# Altium footprint library Switch Push Botton.PcbLib: 48 footprints (part 1 of 3)
Each footprint in its own frame and in the unit in brackets; x right, y up, seen from the top. Pads: shape width x height; smd on the part's side, far side on the other; paste and mask are expansions set on the pad; w line width, h text height; cw(c..) or ccw(c..) is an arc to the next point about the centre after c.
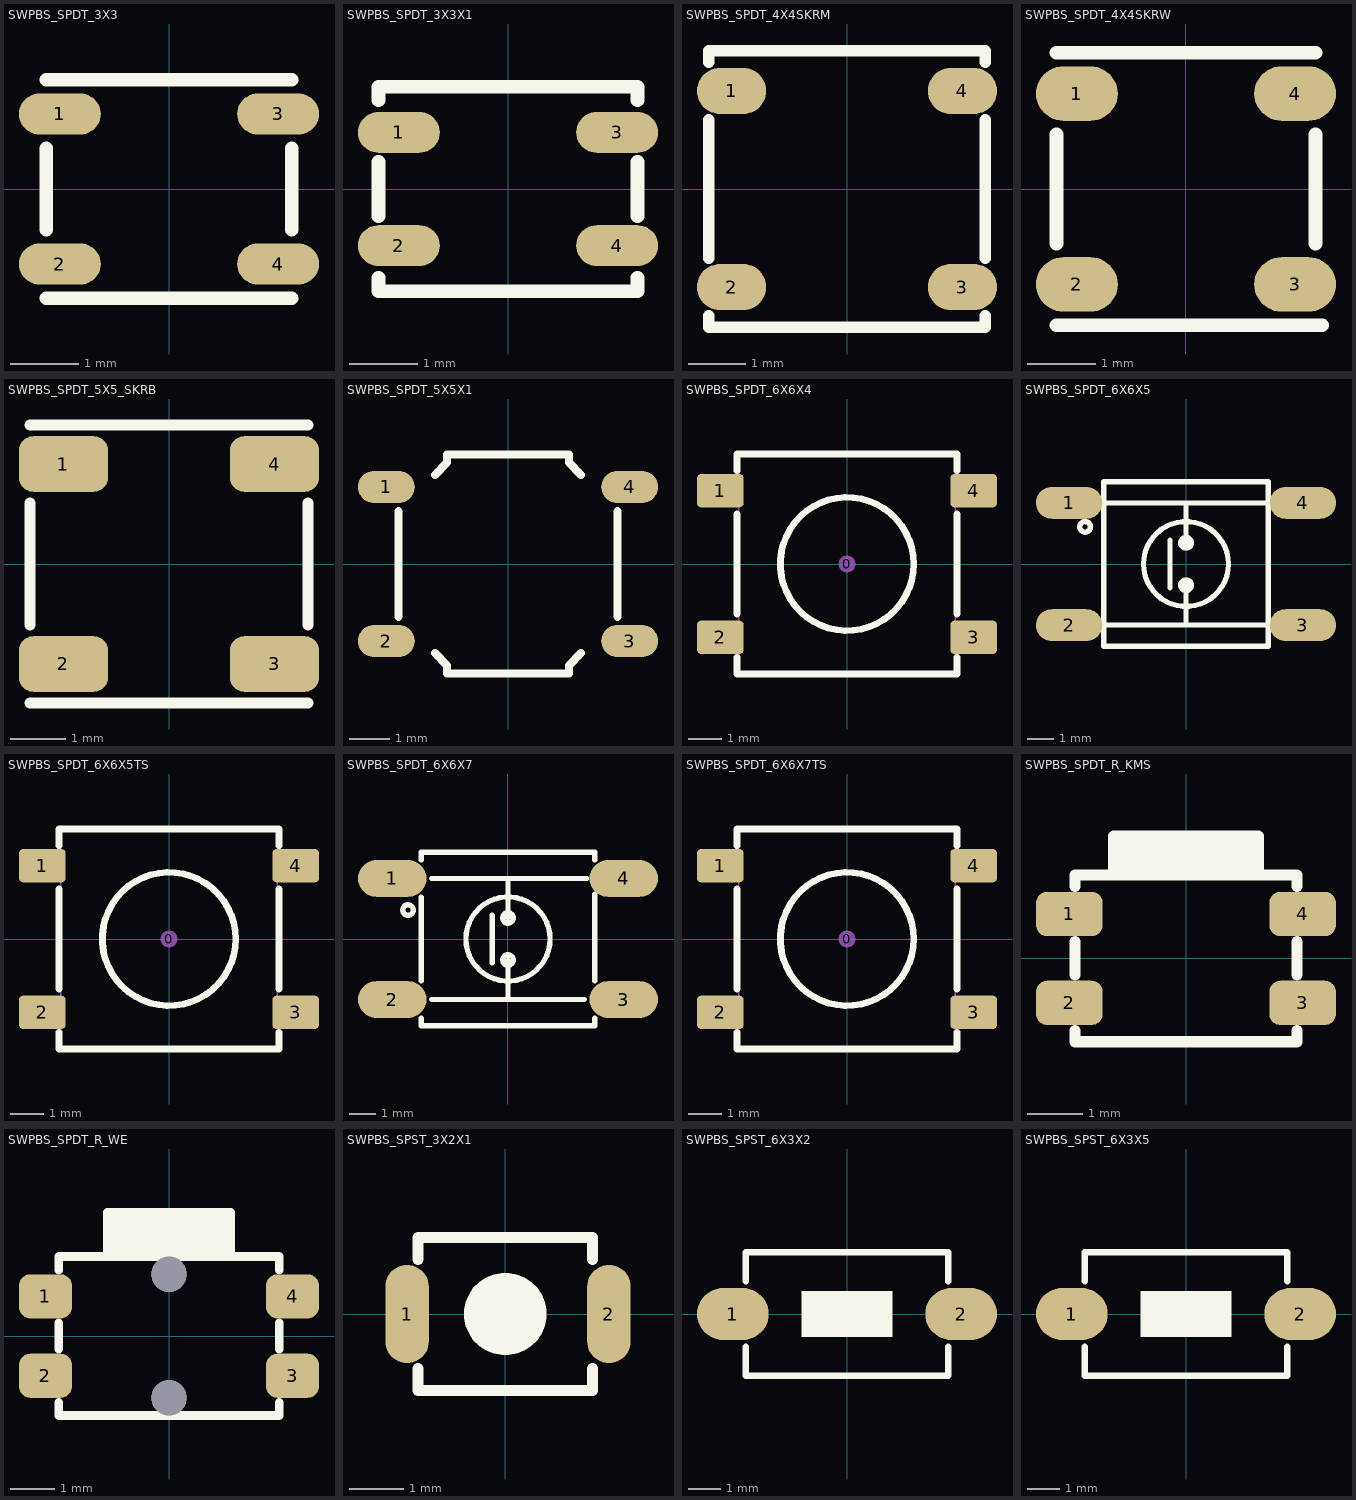
[diagram p0: the footprints below, top view; thin cyan lines are the x and y axes]

## SWPBS_SPDT_3X3 [mm] "SWITCH, PUSHBUTTON, SMD, SPDT, 3.3x2.9 mm, SKSH Series; Height 0.38mm ; 200,000 cycles ; 1.6N Force, SKSHAAE010"
height 0.379
pads (4):
  oval 1.2x0.6 smd mask+0.1: 1(-1.6,1.1) 2(-1.6,-1.1) 3(1.6,1.1) 4(1.6,-1.1)
Top Overlay:
  lines w0.2: -1.8,-1.6 1.8,-1.6 ; -1.8,-0.6 -1.8,0.6 ; -1.8,1.6 1.8,1.6 ; 1.8,-0.6 1.8,0.6
3D body "SKSHAA.STEP": height 0.4, standoff 0.03, extent -1.716,-1.48 1.717,1.48

## SWPBS_SPDT_3X3X1 [mm] "SWITCH, PUSHBUTTON, SMD, SPDT, 3.0x2.7mm, SKSG Series; Height 1.4 mm; 200,000 cycles; 4N force, SKSGAAE010"
height 1.4
pads (4):
  oval 1.2x0.6 smd mask+0.1: 1(-1.6,0.83) 2(-1.6,-0.83) 3(1.6,0.83) 4(1.6,-0.83)
Top Overlay:
  lines w0.2: -1.9,-1.3 -1.9,-1.5 1.9,-1.5 1.9,-1.3 ; -1.9,-0.4 -1.9,0.4 ; -1.9,1.3 -1.9,1.5 1.9,1.5 1.9,1.3 ; 1.9,-0.4 1.9,0.4
3D body "SKSGAA.STEP": height 1.4, standoff 0, extent -1.75,-1.387 1.75,1.387

## SWPBS_SPDT_4X4SKRM [mm] "SWITCH, PUSHBUTTON, SMD, SPDT, SKRM Series ; Height 0.4 mm ; 500,000 cycles ; 1.57N Force, SKRMAAE010"
height 0.4
pads (4):
  oval 1.2x0.8 smd mask+0.1: 1(-2,1.7) 2(-2,-1.7) 3(2,-1.7) 4(2,1.7)
Top Overlay:
  lines w0.2: -2.4,-2.2 -2.4,-2.4 2.4,-2.4 2.4,-2.2 ; -2.4,-1.2 -2.4,1.2 ; -2.4,2.2 -2.4,2.4 2.4,2.4 2.4,2.2 ; 2.4,-1.2 2.4,1.2
3D body "SKRMAA.STEP": height 0.4, standoff 0, extent -2.25,-2.25 2.25,2.25

## SWPBS_SPDT_4X4SKRW [mm] "SWITCH, PUSHBUTTON, SMD, SPDT, SKRW Series ; Height 0.35 mm ; 500,000 cycles ; 1.57N Force, SKRWAEE030"
height 0.35
pads (4):
  oval 1.2x0.8 smd mask+0.1: 1(-1.6,1.4) 2(-1.6,-1.4) 3(1.6,-1.4) 4(1.6,1.4)
Top Overlay:
  lines w0.2: -1.9,-2 2,-2 ; -1.9,-0.8 -1.9,0.8 ; -1.9,2 1.9,2 ; 1.9,-0.8 1.9,0.8
3D body "SKRWAE.STEP": height 0.38, standoff 0.03, extent -1.85,-1.85 1.85,1.85

## SWPBS_SPDT_5X5_SKRB [mm] "SWITCH, PUSHBUTTON, SMD, SPDT, SKRB Series ; Height 0.55 mm ; 2,000,000 cycles ; 1.1N Force, SKRBAGE010"
height 0.55
pads (4):
  rrect50% 1.6x1 smd mask+0.1: 1(-1.9,1.8) 2(-1.9,-1.8) 3(1.9,-1.8) 4(1.9,1.8)
Top Overlay:
  lines w0.2: -2.5,-2.5 2.5,-2.5 ; -2.5,-1.1 -2.5,1.1 ; -2.5,2.5 2.5,2.5 ; 2.5,-1.1 2.5,1.1
3D body "SKRBAG.STEP": height 0.55, standoff 0, extent -2.4,-2.4 2.4,2.4

## SWPBS_SPDT_5X5X1 [mm] "SWITCH, PUSHBUTTON, SMD, SPDT, SKQG Series ; Height 1.5 mm ; 500,000 cycles ; 0.98N Force, SKQGAFE010"
height 1.5
pads (4):
  oval 1.4x0.8 smd mask+0.1: 1(-3,1.9) 2(-3,-1.9) 3(3,-1.9) 4(3,1.9)
Top Overlay:
  lines w0.2: -2.7,-1.3 -2.7,1.3 ; -1.8,-2.2 -1.5,-2.5 -1.5,-2.7 1.5,-2.7 1.5,-2.5 1.8,-2.2 ; -1.8,2.2 -1.5,2.5 -1.5,2.7 1.5,2.7 1.5,2.5 1.8,2.2 ; 2.7,-1.3 2.7,1.3
3D body "SKQGAF.STEP": height 1.53, standoff 0.03, extent -3.2,-2.6 3.2,2.6

## SWPBS_SPDT_6X6X4 [mm] "SWITCH, PUSHBUTTON, SMD, SPDT, 6.5x6.5mm, 4.3mm, TS-1143S"
height 4.3
pads (5):
  round 0.508 on Mech15 mask+0.1: 0(0,0)
  rrect25% 1.4x1 smd mask+0.1: 1(-3.8,2.2) 2(-3.8,-2.2) 3(3.8,-2.2) 4(3.8,2.2)
Top Overlay:
  circle w0.2: c0,0 r2
  lines w0.2: -3.3,-2.8 -3.3,-3.3 3.3,-3.3 3.3,-2.8 ; -3.3,-1.5 -3.3,1.5 ; -3.3,2.8 -3.3,3.3 3.3,3.3 3.3,2.8 ; 3.3,-1.5 3.3,1.5
Mechanical 13:
  lines w0.05: -3.25,-3.25 -3.25,3.25 3.25,3.25 3.25,-3.25 -3.25,-3.25
3D body "TS-1143S-WP.STEP": height 4.3, standoff 0, extent -4,-3.25 4,3.25

## SWPBS_SPDT_6X6X5 [mm] "SWITCH, PUSHBUTTON, SMD, SPDT, 6X6mm 4PIN"
height 5
pads (4):
  oval 2.5x1.2 smd mask+0.1: 1(-4.4,2.3) 2(-4.4,-2.3) 3(4.4,-2.3) 4(4.4,2.3)
Top Overlay:
  circle w0.2: c0,-0.8 r0.2
  circle w0.2: c0,0.8 r0.2
  circle w0.2: c0,0 r1.6
  circle w0.2: c-3.8,1.4 r0.2
  lines w0.2: -3.1,-2.3 3,-2.3 ; -3.1,2.3 3,2.3 ; -0.6,-0.9 -0.6,0.9 ; 0,-2.3 0,-0.8 ; 0,0.8 0,2.3 ; -3.1,-3.1 -3.1,3.1 3.1,3.1 3.1,-3.1 -3.1,-3.1
3D body "User Library-FSM4JSMATR - TE Connectivity - SPST 6mm Tactile Switch.step": height 5.07, standoff 0.1, extent -5,-3 5,3

## SWPBS_SPDT_6X6X5TS [mm] "SWITCH, PUSHBUTTON, SMD, SPDT, 6.5x6.5mm, 5.0mm, TS-1150S"
height 5
pads (5):
  round 0.508 on Mech15 mask+0.1: 0(0,0)
  rrect25% 1.4x1 smd mask+0.1: 1(-3.8,2.2) 2(-3.8,-2.2) 3(3.8,-2.2) 4(3.8,2.2)
Top Overlay:
  circle w0.2: c0,0 r2
  lines w0.2: -3.3,-2.8 -3.3,-3.3 3.3,-3.3 3.3,-2.8 ; -3.3,-1.5 -3.3,1.5 ; -3.3,2.8 -3.3,3.3 3.3,3.3 3.3,2.8 ; 3.3,-1.5 3.3,1.5
Mechanical 13:
  lines w0.05: -3.25,-3.25 -3.25,3.25 3.25,3.25 3.25,-3.25 -3.25,-3.25
3D body "TS-1150S-WP.STEP": height 5, standoff 0, extent -4,-3.25 4,3.25

## SWPBS_SPDT_6X6X7 [mm] "SWITCH, PUSHBUTTON, SMD, SPDT, 6.2x6.2x7.3mm, TACTDQ62"
height 7
pads (4):
  oval 2.6x1.4 smd mask+0.1: 1(-4.4,2.3) 2(-4.4,-2.3) 3(4.4,-2.3) 4(4.4,2.3)
Top Overlay:
  circle w0.2: c-3.8,1.1 r0.2
  circle w0.2: c0,0 r1.6
  circle w0.2: c0,0.8 r0.2
  circle w0.2: c0,-0.8 r0.2
  lines w0.2: -3.3,-3 -3.3,-3.3 3.3,-3.3 3.3,-3 ; -3.3,-1.6 -3.3,1.6 ; -3.3,3 -3.3,3.3 3.3,3.3 3.3,3 ; -2.9,-2.3 2.9,-2.3 ; -2.9,2.3 3,2.3 ; -0.6,-0.9 -0.6,0.9 ; 0,-2.3 0,-0.8 ; 0,0.8 0,2.3 ; 3.3,-1.6 3.3,1.7
3D body "User Library-KT11P2SM.STEP": height 5.48, standoff -0.05, extent -5.034,-3.172 5,3.172

## SWPBS_SPDT_6X6X7TS [mm] "SWITCH, PUSHBUTTON, SMD, SPDT, 7.0mm, TS-1170S"
height 7
pads (5):
  round 0.508 on Mech15 mask+0.1: 0(0,0)
  rrect25% 1.4x1 smd mask+0.1: 1(-3.8,2.2) 2(-3.8,-2.2) 3(3.8,-2.2) 4(3.8,2.2)
Top Overlay:
  circle w0.2: c0,0 r2
  lines w0.2: -3.3,-2.8 -3.3,-3.3 3.3,-3.3 3.3,-2.8 ; -3.3,-1.5 -3.3,1.5 ; -3.3,2.8 -3.3,3.3 3.3,3.3 3.3,2.8 ; 3.3,-1.5 3.3,1.5
Mechanical 13:
  lines w0.05: -3.25,-3.25 3.25,-3.25 3.25,3.25 -3.25,3.25 -3.25,-3.25
3D body "TS-1170S-WP.stp": height 7, standoff 0, extent -4,-3.25 4,3.25

## SWPBS_SPDT_R_KMS [mm] "SWITCH, PUSHBUTTON, SMD, SPDT, RIGHT"
pads (4):
  rrect50% 1.2x0.8 smd mask+0.1: 1(-2.1,0.8) 2(-2.1,-0.8) 3(2.1,-0.8) 4(2.1,0.8)
Top Overlay:
  rectangle: -1.3,1.5 1.3,2.2
  lines w0.2: -2,-1.3 -2,-1.5 2,-1.5 2,-1.3 ; -2,-0.3 -2,0.3 ; -2,1.3 -2,1.5 2,1.5 2,1.3 ; -1.3,1.5 -1.3,2.2 1.3,2.2 1.3,1.5 ; 2,-0.3 2,0.3
3D body "KMS221GLFS.stp": height 1.42, standoff -0.02, extent -2.3,-1.4 2.3,2.15

## SWPBS_SPDT_R_WE [mm] "SWITCH, PUSHBUTTON, SMD, SPDT, RIGHT"
pads (6):
  rrect50% 1.2x1 smd mask+0.1: 1(-2.8,0.9) 2(-2.8,-0.9) 3(2.8,-0.9) 4(2.8,0.9)
  round 0.8 hole 0.8 unplated: ""(0,-1.4) ""(0,1.4)
Top Overlay:
  rectangle: -1.4,1.8 1.4,2.8
  lines w0.2: -2.5,-1.5 -2.5,-1.8 2.5,-1.8 2.5,-1.5 ; -2.5,-0.3 -2.5,0.3 ; -2.5,1.5 -2.5,1.8 2.5,1.8 2.5,1.5 ; -1.4,1.8 -1.4,2.8 1.4,2.8 1.4,1.8 ; 2.5,-0.3 2.5,0.3
3D body "436331045822 (rev1).stp": height 1.65, standoff -0.5, extent -3.2,-1.75 3.2,2.75

## SWPBS_SPST_3X2X1 [mm] "SWITCH, PUSHBUTTON, SMD, SPST, 3X2.5mm"
height 1.2
pads (2):
  oval 0.8x1.8 smd mask+0.1: 1(-1.8,0) 2(1.9,0)
Top Overlay:
  region: -0.75,0 -0.75,0.074 -0.721,0.219 -0.665,0.355 -0.583,0.478 -0.478,0.583 -0.355,0.665 -0.219,0.721 -0.074,0.75 0,0.75 0.074,0.75 0.219,0.721 0.355,0.665 0.478,0.583 0.583,0.478 0.665,0.355 0.721,0.219 0.75,0.074 0.75,0 0.75,-0.074 0.721,-0.219 0.665,-0.355 0.583,-0.478 0.478,-0.583 0.355,-0.665 0.219,-0.721 0.074,-0.75 0,-0.75 -0.074,-0.75 -0.219,-0.721 -0.355,-0.665 -0.478,-0.583 -0.583,-0.478 -0.665,-0.355 -0.721,-0.219 -0.75,-0.074
  lines w0.2: -1.6,-1 -1.6,-1.4 1.6,-1.4 1.6,-1 ; -1.6,1 -1.6,1.4 1.6,1.4 1.6,1
3D body: height 1.2, standoff 0, extent -1.5,-1.25 1.5,1.25
3D body: height 0.1, standoff 0, extent -2,-0.7 -1.5,0.7
3D body: height 0.1, standoff 0, extent 1.5,-0.7 2,0.7
3D body: height 1.6, standoff 1.2, extent -0.75,-0.75 0.75,0.75

## SWPBS_SPST_6X3X2 [mm] "SWITCH, PUSHBUTTON, SMD, SPST, 6X3.5X2.5mm, RS-282G05A3, SKQYPA, 50000 Cycles"
height 5
pads (2):
  oval 2.2x1.6 smd mask+0.1: 1(-3.5,0) 2(3.5,0)
Top Overlay:
  region: 1.4,0.7 -1.4,0.7 -1.4,-0.7 1.4,-0.7
  lines w0.2: -3.1,-1 -3.1,-1.9 3.1,-1.9 3.1,-1 ; -3.1,1 -3.1,1.9 3.1,1.9 3.1,1
3D body "SKQYPA_43452.stp": height 2.5, standoff 0, extent -3.397,-1.858 3.397,1.859

## SWPBS_SPST_6X3X5 [mm] "SWITCH, PUSHBUTTON, SMD, SPST, 6X3.5mm, SKQMBBE010, 50000 Cycles, 1.57N Force"
height 5
pads (2):
  oval 2.2x1.6 smd mask+0.1: 1(-3.5,0) 2(3.5,0)
Top Overlay:
  region: 1.4,0.7 -1.4,0.7 -1.4,-0.7 1.4,-0.7
  lines w0.2: -3.1,-1 -3.1,-1.9 3.1,-1.9 3.1,-1 ; -3.1,1 -3.1,1.9 3.1,1.9 3.1,1
3D body "43685.stp": height 5, standoff 0, extent -3.649,-1.75 3.65,1.75